# Altium footprint library FootPrintLib_0.PcbLib: 266 footprints (part 2 of 17)
Each footprint in its own frame and in the unit in brackets; x right, y up, seen from the top. Pads: shape width x height; smd on the part's side, far side on the other; paste and mask are expansions set on the pad; w line width, h text height; cw(c..) or ccw(c..) is an arc to the next point about the centre after c.
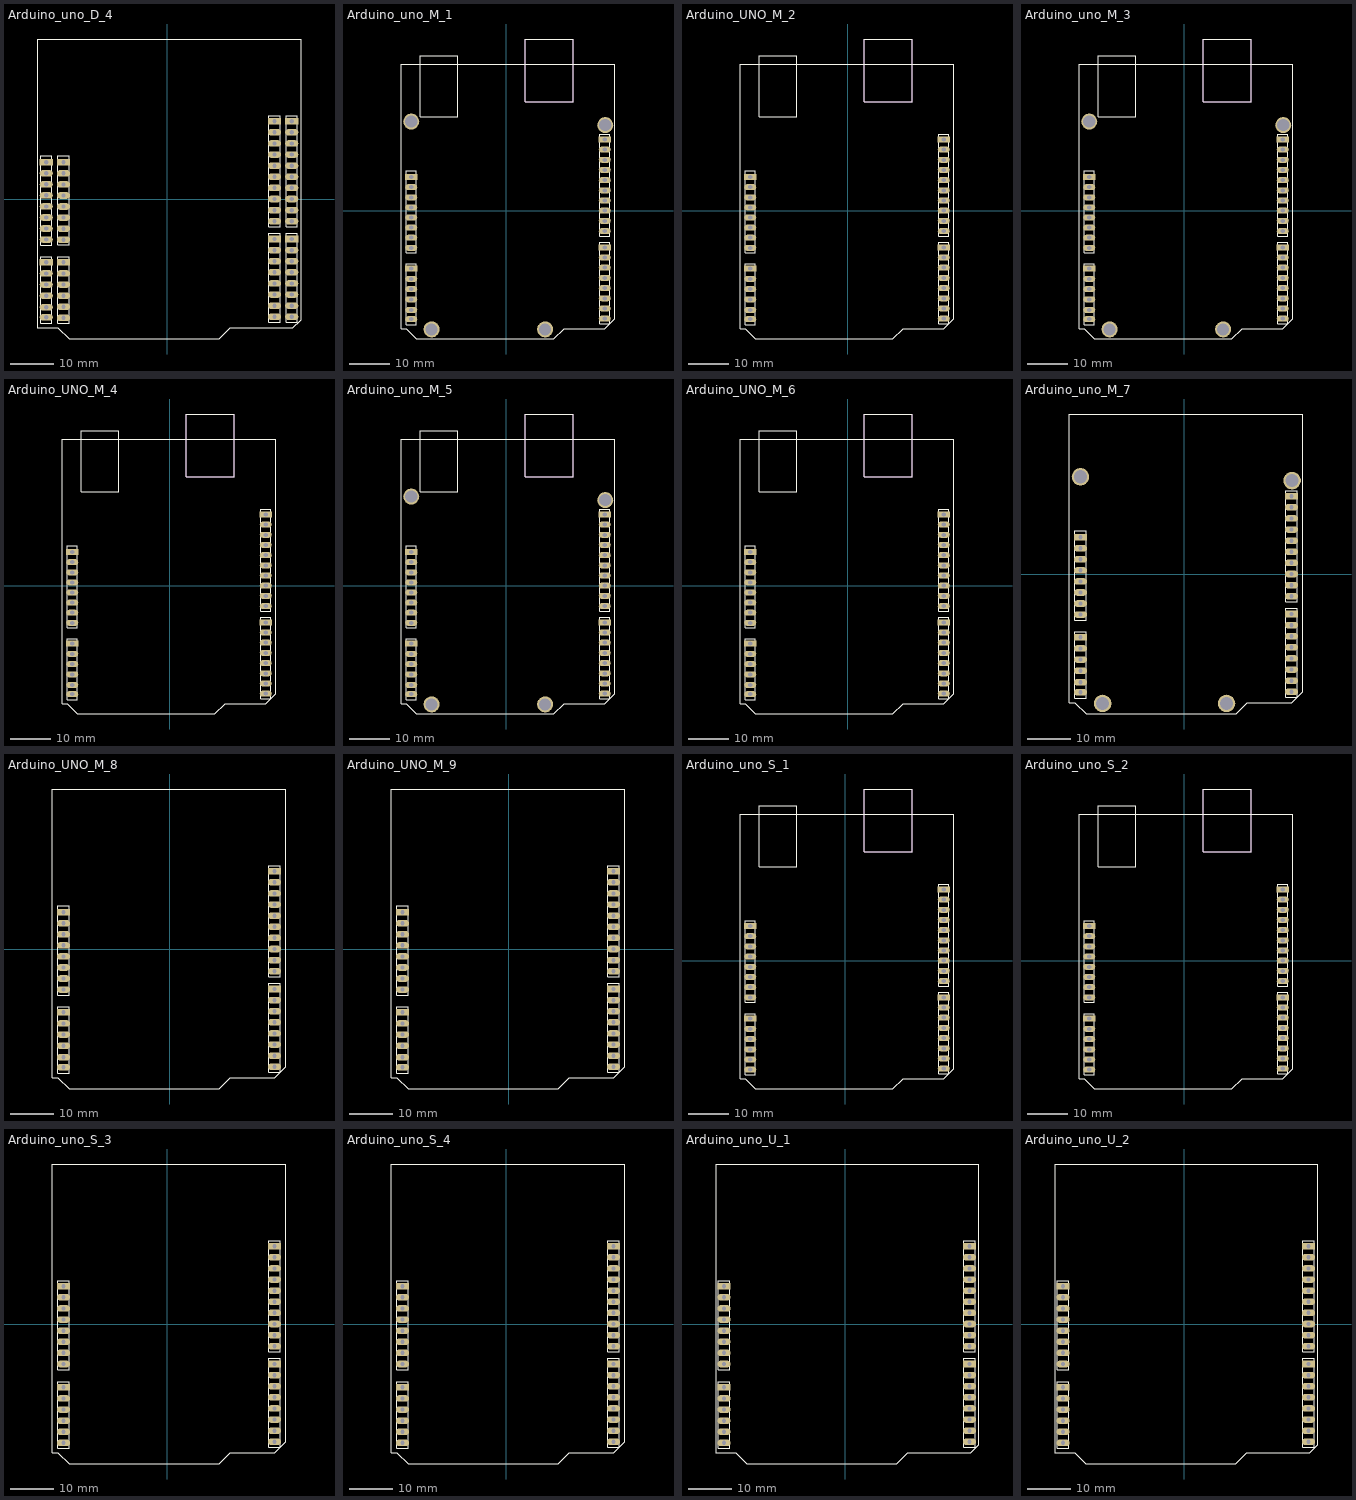
[diagram p1: the footprints below, top view; thin cyan lines are the x and y axes]

## Arduino_uno_D_4 [mm]
pads (64):
  rect 3x1.5 hole 1: 1(-27.686,8.382) 1(-23.749,8.37) 9(-27.686,-14.478) 9(-23.749,-14.478) 22(24.511,-9.144) 22(28.448,-9.144) 32(24.511,17.78) 32(28.448,17.78)
  oval 3x1.5 hole 1: 2(-27.686,5.86) 2(-23.749,5.848) 3(-27.686,3.338) 3(-23.749,3.326) 4(-27.686,0.816) 4(-23.749,0.804) 5(-27.686,-1.705) 5(-23.749,-1.717) 6(-27.686,-4.227) 6(-23.749,-4.239) 7(-27.686,-6.749) 7(-23.749,-6.761) 8(-27.686,-9.271) 8(-23.749,-9.283) 10(-27.686,-17.018) 10(-23.749,-17.018) 11(-27.686,-19.558) 11(-23.749,-19.558) 12(-27.686,-22.098) 12(-23.749,-22.098) 13(-27.686,-24.765) 13(-23.749,-24.638) 14(-27.686,-27.051) 14(-23.749,-27.178) 15(24.511,-26.924) 15(28.448,-26.924) 16(24.511,-24.384) 16(28.448,-24.384) 17(24.511,-21.844) 17(28.448,-21.844) 18(24.511,-19.304) 18(28.448,-19.304) 19(24.511,-16.764) 19(28.448,-16.764) 20(24.511,-14.224) 20(28.448,-14.224) 21(24.511,-11.684) 21(28.448,-11.684) 23(24.511,-5.08) 23(28.448,-5.08) 24(24.511,-2.54) 24(28.448,-2.54) 25(24.511,0) 25(28.448,0) 26(24.511,2.54) 26(28.448,2.54) 27(24.511,5.08) 27(28.448,5.08) 28(24.511,7.62) 28(28.448,7.62) 29(24.511,10.16) 29(28.448,10.16) 30(24.511,12.7) 30(28.448,12.7) 31(24.511,15.24) 31(28.448,15.24)
Top Overlay:
  lines w0.127: -29.718,-29.464 -25.019,-29.464 -22.479,-32.004 11.811,-32.004 14.351,-29.464 28.702,-29.464 30.48,-27.686 30.48,36.576 -29.718,36.576 -29.718,-29.464
  lines w0.2: -25.019,-28.448 -22.479,-28.448 -22.479,-13.208 -25.019,-13.208 -25.019,-28.448 ; -25.019,-10.414 -22.479,-10.414 -22.479,9.906 -25.019,9.906 -25.019,-10.414 ; 23.241,-28.194 25.781,-28.194 25.781,-7.874 23.241,-7.874 23.241,-28.194 ; 23.241,-6.35 25.781,-6.35 25.781,-1.27 25.781,19.05 23.241,19.05 23.241,-1.27 23.241,-6.35
  lines w0.254: -28.956,-28.448 -26.416,-28.448 -26.416,-15.748 -26.416,-13.208 -27.686,-13.208 -28.956,-13.208 -28.956,-15.748 -28.956,-28.448 ; -28.956,-10.541 -26.416,-10.541 -26.416,9.906 -28.956,9.906 -28.956,-10.541 ; 27.178,-28.194 27.178,-7.874 29.718,-7.874 29.718,-28.194 27.178,-28.194 ; 27.178,-6.35 29.718,-6.35 29.718,-3.81 29.718,19.05 27.178,19.05 27.178,-3.81 27.178,-6.35

## Arduino_uno_M_1 [mm]
pads (36):
  rect 3x1.5 hole 1: 1(-23.749,8.382) 9(-23.749,-14.478) 22(24.511,-9.144) 32(24.511,17.78)
  oval 3x1.5 hole 1: 2(-23.749,5.86) 3(-23.749,3.338) 4(-23.749,0.816) 5(-23.749,-1.705) 6(-23.749,-4.227) 7(-23.749,-6.749) 8(-23.749,-9.271) 10(-23.749,-17.018) 11(-23.749,-19.558) 12(-23.749,-22.098) 13(-23.749,-24.765) 14(-23.749,-27.051) 15(24.511,-26.924) 16(24.511,-24.384) 17(24.511,-21.844) 18(24.511,-19.304) 19(24.511,-16.764) 20(24.511,-14.224) 21(24.511,-11.684) 23(24.511,-5.08) 24(24.511,-2.54) 25(24.511,0) 26(24.511,2.54) 27(24.511,5.08) 28(24.511,7.62) 29(24.511,10.16) 30(24.511,12.7) 31(24.511,15.24)
  round 4 hole 3: ""(-23.749,22.225) ""(-18.669,-29.591) ""(9.652,-29.591) ""(24.638,21.336)
Top Overlay:
  lines w0.127: -26.289,-29.464 -25.019,-29.464 -22.479,-32.004 11.811,-32.004 14.351,-29.464 24.511,-29.464 27.051,-26.924 27.051,36.576 -26.289,36.576 -26.289,-29.464
  lines w0.2: -21.537,29.208 -21.537,38.608 -12.137,38.608 -12.137,23.408 -19.05,23.408 ; -21.537,29.21 -21.537,23.408 -18.987,23.408 ; 4.648,34.839 4.648,42.819 16.688,42.819 16.688,34.839 ; 4.648,35.56 4.648,27.109 8.218,27.109 ; 8.128,27.109 16.688,27.109 16.688,34.798 ; 10.618,27.109 10.958,27.109
  lines w0.254: -25.019,-28.448 -25.019,-15.748 -25.019,-13.208 -23.749,-13.208 -22.479,-13.208 -22.479,-15.748 -22.479,-28.448 -25.019,-28.448 ; -25.019,-10.541 -25.019,9.906 -22.479,9.906 -22.479,-10.541 -25.019,-10.541 ; 23.241,-28.194 25.781,-28.194 25.781,-7.874 23.241,-7.874 23.241,-28.194 ; 23.241,-6.35 23.241,-3.81 23.241,19.05 25.781,19.05 25.781,-3.81 25.781,-6.35 23.241,-6.35
Mechanical 13:
  lines w0.1: 4.648,27.109 16.688,27.109 16.688,42.819 4.648,42.819 4.648,27.109
3D body "14389.STEP": height 10.95, standoff -3.7, extent 3.218,26.329 18.118,42.829
3D body "SW3dPS-PowerJack-2.5x5.7mm.STEP": height 11, standoff -3.5, extent -21.537,23.408 -12.137,38.608
3D body "61301011821.stp": height 8.55, standoff -3.06, extent 23.098,-6.666 25.598,19.234
3D body "61300811821.stp": height 8.55, standoff -3.06, extent 23.047,-28.586 25.547,-7.766
3D body "61300811821.stp": height 8.55, standoff -3.06, extent -24.897,-10.537 -22.397,10.283
3D body "61300611821.stp": height 8.55, standoff -3.06, extent -24.897,-28.622 -22.397,-12.882

## Arduino_UNO_M_2 [mm]
pads (32):
  rect 3x1.5 hole 1: 1(-24.257,8.382) 9(-24.257,-14.478) 22(24.003,-9.144) 32(24.003,17.78)
  oval 3x1.5 hole 1: 2(-24.257,5.86) 3(-24.257,3.338) 4(-24.257,0.816) 5(-24.257,-1.705) 6(-24.257,-4.227) 7(-24.257,-6.749) 8(-24.257,-9.271) 10(-24.257,-17.018) 11(-24.257,-19.558) 12(-24.257,-22.098) 13(-24.257,-24.765) 14(-24.257,-27.051) 15(24.003,-26.924) 16(24.003,-24.384) 17(24.003,-21.844) 18(24.003,-19.304) 19(24.003,-16.764) 20(24.003,-14.224) 21(24.003,-11.684) 23(24.003,-5.08) 24(24.003,-2.54) 25(24.003,0) 26(24.003,2.54) 27(24.003,5.08) 28(24.003,7.62) 29(24.003,10.16) 30(24.003,12.7) 31(24.003,15.24)
Top Overlay:
  lines w0.127: -26.797,-29.464 -25.527,-29.464 -22.987,-32.004 11.303,-32.004 13.843,-29.464 24.003,-29.464 26.543,-26.924 26.543,36.576 -26.797,36.576 -26.797,-29.464
  lines w0.2: -22.045,29.208 -22.045,38.608 -12.645,38.608 -12.645,23.408 -19.558,23.408 ; -22.045,29.21 -22.045,23.408 -19.495,23.408 ; 4.14,34.839 4.14,42.819 16.18,42.819 16.18,34.839 ; 4.14,35.56 4.14,27.109 7.71,27.109 ; 7.62,27.109 16.18,27.109 16.18,34.798 ; 10.11,27.109 10.45,27.109
  lines w0.254: -25.527,-28.448 -25.527,-15.748 -25.527,-13.208 -24.257,-13.208 -22.987,-13.208 -22.987,-15.748 -22.987,-28.448 -25.527,-28.448 ; -25.527,-10.541 -25.527,9.906 -22.987,9.906 -22.987,-10.541 -25.527,-10.541 ; 22.733,-28.194 25.273,-28.194 25.273,-7.874 22.733,-7.874 22.733,-28.194 ; 22.733,-6.35 22.733,-3.81 22.733,19.05 25.273,19.05 25.273,-3.81 25.273,-6.35 22.733,-6.35
Mechanical 13:
  lines w0.1: 4.14,27.109 16.18,27.109 16.18,42.819 4.14,42.819 4.14,27.109
3D body "14389.STEP": height 10.95, standoff -3.7, extent 2.71,26.329 17.61,42.829
3D body "SW3dPS-PowerJack-2.5x5.7mm.STEP": height 11, standoff -3.5, extent -22.045,23.408 -12.645,38.608
3D body "61300611821.stp": height 8.55, standoff -3.06, extent -25.481,-28.622 -22.981,-12.882
3D body "61300811821.stp": height 8.55, standoff -3.06, extent -25.481,-10.537 -22.981,10.283
3D body "61300811821.stp": height 8.55, standoff -3.06, extent 22.793,-28.586 25.293,-7.766
3D body "61301011821.stp": height 8.55, standoff -3.06, extent 22.844,-6.666 25.344,19.234

## Arduino_uno_M_3 [mm]
pads (36):
  rect 3x1.5 hole 1: 1(-23.749,8.382) 9(-23.749,-14.478) 22(24.511,-9.144) 32(24.511,17.78)
  oval 3x1.5 hole 1: 2(-23.749,5.86) 3(-23.749,3.338) 4(-23.749,0.816) 5(-23.749,-1.705) 6(-23.749,-4.227) 7(-23.749,-6.749) 8(-23.749,-9.271) 10(-23.749,-17.018) 11(-23.749,-19.558) 12(-23.749,-22.098) 13(-23.749,-24.765) 14(-23.749,-27.051) 15(24.511,-26.924) 16(24.511,-24.384) 17(24.511,-21.844) 18(24.511,-19.304) 19(24.511,-16.764) 20(24.511,-14.224) 21(24.511,-11.684) 23(24.511,-5.08) 24(24.511,-2.54) 25(24.511,0) 26(24.511,2.54) 27(24.511,5.08) 28(24.511,7.62) 29(24.511,10.16) 30(24.511,12.7) 31(24.511,15.24)
  round 4 hole 3: ""(-23.749,22.225) ""(-18.669,-29.591) ""(9.652,-29.591) ""(24.638,21.336)
Top Overlay:
  lines w0.127: -26.289,-29.464 -25.019,-29.464 -22.479,-32.004 11.811,-32.004 14.351,-29.464 24.511,-29.464 27.051,-26.924 27.051,36.576 -26.289,36.576 -26.289,-29.464
  lines w0.2: -21.537,29.208 -21.537,38.608 -12.137,38.608 -12.137,23.408 -19.05,23.408 ; -21.537,29.21 -21.537,23.408 -18.987,23.408 ; 4.648,34.839 4.648,42.819 16.688,42.819 16.688,34.839 ; 4.648,35.56 4.648,27.109 8.218,27.109 ; 8.128,27.109 16.688,27.109 16.688,34.798 ; 10.618,27.109 10.958,27.109
  lines w0.254: -25.019,-28.448 -25.019,-15.748 -25.019,-13.208 -23.749,-13.208 -22.479,-13.208 -22.479,-15.748 -22.479,-28.448 -25.019,-28.448 ; -25.019,-10.541 -25.019,9.906 -22.479,9.906 -22.479,-10.541 -25.019,-10.541 ; 23.241,-28.194 25.781,-28.194 25.781,-7.874 23.241,-7.874 23.241,-28.194 ; 23.241,-6.35 23.241,-3.81 23.241,19.05 25.781,19.05 25.781,-3.81 25.781,-6.35 23.241,-6.35
Mechanical 13:
  lines w0.1: 4.648,27.109 16.688,27.109 16.688,42.819 4.648,42.819 4.648,27.109
3D body "61301011821.stp": height 8.55, standoff -3.06, extent 23.199,-6.818 25.699,19.082
3D body "61300811821.stp": height 8.55, standoff -3.06, extent 23.149,-28.738 25.649,-7.918
3D body "61300811821.stp": height 8.55, standoff -3.06, extent -25.126,-10.613 -22.626,10.207
3D body "61300611821.stp": height 8.55, standoff -3.06, extent -25.126,-28.698 -22.626,-12.958

## Arduino_UNO_M_4 [mm]
pads (32):
  rect 3x1.5 hole 1: 1(-24.257,8.382) 9(-24.257,-14.478) 22(24.003,-9.144) 32(24.003,17.78)
  oval 3x1.5 hole 1: 2(-24.257,5.86) 3(-24.257,3.338) 4(-24.257,0.816) 5(-24.257,-1.705) 6(-24.257,-4.227) 7(-24.257,-6.749) 8(-24.257,-9.271) 10(-24.257,-17.018) 11(-24.257,-19.558) 12(-24.257,-22.098) 13(-24.257,-24.765) 14(-24.257,-27.051) 15(24.003,-26.924) 16(24.003,-24.384) 17(24.003,-21.844) 18(24.003,-19.304) 19(24.003,-16.764) 20(24.003,-14.224) 21(24.003,-11.684) 23(24.003,-5.08) 24(24.003,-2.54) 25(24.003,0) 26(24.003,2.54) 27(24.003,5.08) 28(24.003,7.62) 29(24.003,10.16) 30(24.003,12.7) 31(24.003,15.24)
Top Overlay:
  lines w0.127: -26.797,-29.464 -25.527,-29.464 -22.987,-32.004 11.303,-32.004 13.843,-29.464 24.003,-29.464 26.543,-26.924 26.543,36.576 -26.797,36.576 -26.797,-29.464
  lines w0.2: -22.045,29.208 -22.045,38.608 -12.645,38.608 -12.645,23.408 -19.558,23.408 ; -22.045,29.21 -22.045,23.408 -19.495,23.408 ; 4.14,34.839 4.14,42.819 16.18,42.819 16.18,34.839 ; 4.14,35.56 4.14,27.109 7.71,27.109 ; 7.62,27.109 16.18,27.109 16.18,34.798 ; 10.11,27.109 10.45,27.109
  lines w0.254: -25.527,-28.448 -25.527,-15.748 -25.527,-13.208 -24.257,-13.208 -22.987,-13.208 -22.987,-15.748 -22.987,-28.448 -25.527,-28.448 ; -25.527,-10.541 -25.527,9.906 -22.987,9.906 -22.987,-10.541 -25.527,-10.541 ; 22.733,-28.194 25.273,-28.194 25.273,-7.874 22.733,-7.874 22.733,-28.194 ; 22.733,-6.35 22.733,-3.81 22.733,19.05 25.273,19.05 25.273,-3.81 25.273,-6.35 22.733,-6.35
Mechanical 13:
  lines w0.1: 4.14,27.109 16.18,27.109 16.18,42.819 4.14,42.819 4.14,27.109
3D body "61301011821.stp": height 8.55, standoff -3.06, extent 22.844,-6.666 25.344,19.234
3D body "61300811821.stp": height 8.55, standoff -3.06, extent 22.793,-28.586 25.293,-7.766
3D body "61300811821.stp": height 8.55, standoff -3.06, extent -25.634,-10.69 -23.134,10.13
3D body "61300611821.stp": height 8.55, standoff -3.06, extent -25.634,-28.774 -23.134,-13.034

## Arduino_uno_M_5 [mm]
pads (36):
  rect 3x1.5 hole 1: 1(-23.749,8.382) 9(-23.749,-14.478) 22(24.511,-9.144) 32(24.511,17.78)
  oval 3x1.5 hole 1: 2(-23.749,5.86) 3(-23.749,3.338) 4(-23.749,0.816) 5(-23.749,-1.705) 6(-23.749,-4.227) 7(-23.749,-6.749) 8(-23.749,-9.271) 10(-23.749,-17.018) 11(-23.749,-19.558) 12(-23.749,-22.098) 13(-23.749,-24.765) 14(-23.749,-27.051) 15(24.511,-26.924) 16(24.511,-24.384) 17(24.511,-21.844) 18(24.511,-19.304) 19(24.511,-16.764) 20(24.511,-14.224) 21(24.511,-11.684) 23(24.511,-5.08) 24(24.511,-2.54) 25(24.511,0) 26(24.511,2.54) 27(24.511,5.08) 28(24.511,7.62) 29(24.511,10.16) 30(24.511,12.7) 31(24.511,15.24)
  round 4 hole 3: ""(-23.749,22.225) ""(-18.669,-29.591) ""(9.652,-29.591) ""(24.638,21.336)
Top Overlay:
  lines w0.127: -26.289,-29.464 -25.019,-29.464 -22.479,-32.004 11.811,-32.004 14.351,-29.464 24.511,-29.464 27.051,-26.924 27.051,36.576 -26.289,36.576 -26.289,-29.464
  lines w0.2: -21.537,29.208 -21.537,38.608 -12.137,38.608 -12.137,23.408 -19.05,23.408 ; -21.537,29.21 -21.537,23.408 -18.987,23.408 ; 4.648,34.839 4.648,42.819 16.688,42.819 16.688,34.839 ; 4.648,35.56 4.648,27.109 8.218,27.109 ; 8.128,27.109 16.688,27.109 16.688,34.798 ; 10.618,27.109 10.958,27.109
  lines w0.254: -25.019,-28.448 -25.019,-15.748 -25.019,-13.208 -23.749,-13.208 -22.479,-13.208 -22.479,-15.748 -22.479,-28.448 -25.019,-28.448 ; -25.019,-10.541 -25.019,9.906 -22.479,9.906 -22.479,-10.541 -25.019,-10.541 ; 23.241,-28.194 25.781,-28.194 25.781,-7.874 23.241,-7.874 23.241,-28.194 ; 23.241,-6.35 23.241,-3.81 23.241,19.05 25.781,19.05 25.781,-3.81 25.781,-6.35 23.241,-6.35
Mechanical 13:
  lines w0.1: 4.648,27.109 16.688,27.109 16.688,42.819 4.648,42.819 4.648,27.109

## Arduino_UNO_M_6 [mm]
pads (32):
  rect 3x1.5 hole 1: 1(-24.257,8.382) 9(-24.257,-14.478) 22(24.003,-9.144) 32(24.003,17.78)
  oval 3x1.5 hole 1: 2(-24.257,5.86) 3(-24.257,3.338) 4(-24.257,0.816) 5(-24.257,-1.705) 6(-24.257,-4.227) 7(-24.257,-6.749) 8(-24.257,-9.271) 10(-24.257,-17.018) 11(-24.257,-19.558) 12(-24.257,-22.098) 13(-24.257,-24.765) 14(-24.257,-27.051) 15(24.003,-26.924) 16(24.003,-24.384) 17(24.003,-21.844) 18(24.003,-19.304) 19(24.003,-16.764) 20(24.003,-14.224) 21(24.003,-11.684) 23(24.003,-5.08) 24(24.003,-2.54) 25(24.003,0) 26(24.003,2.54) 27(24.003,5.08) 28(24.003,7.62) 29(24.003,10.16) 30(24.003,12.7) 31(24.003,15.24)
Top Overlay:
  lines w0.127: -26.797,-29.464 -25.527,-29.464 -22.987,-32.004 11.303,-32.004 13.843,-29.464 24.003,-29.464 26.543,-26.924 26.543,36.576 -26.797,36.576 -26.797,-29.464
  lines w0.2: -22.045,29.208 -22.045,38.608 -12.645,38.608 -12.645,23.408 -19.558,23.408 ; -22.045,29.21 -22.045,23.408 -19.495,23.408 ; 4.14,34.839 4.14,42.819 16.18,42.819 16.18,34.839 ; 4.14,35.56 4.14,27.109 7.71,27.109 ; 7.62,27.109 16.18,27.109 16.18,34.798 ; 10.11,27.109 10.45,27.109
  lines w0.254: -25.527,-28.448 -25.527,-15.748 -25.527,-13.208 -24.257,-13.208 -22.987,-13.208 -22.987,-15.748 -22.987,-28.448 -25.527,-28.448 ; -25.527,-10.541 -25.527,9.906 -22.987,9.906 -22.987,-10.541 -25.527,-10.541 ; 22.733,-28.194 25.273,-28.194 25.273,-7.874 22.733,-7.874 22.733,-28.194 ; 22.733,-6.35 22.733,-3.81 22.733,19.05 25.273,19.05 25.273,-3.81 25.273,-6.35 22.733,-6.35
Mechanical 13:
  lines w0.1: 4.14,27.109 16.18,27.109 16.18,42.819 4.14,42.819 4.14,27.109

## Arduino_uno_M_7 [mm]
pads (36):
  rect 3x1.5 hole 1: 1(-23.749,8.382) 9(-23.749,-14.478) 22(24.511,-9.144) 32(24.511,17.78)
  oval 3x1.5 hole 1: 2(-23.749,5.86) 3(-23.749,3.338) 4(-23.749,0.816) 5(-23.749,-1.705) 6(-23.749,-4.227) 7(-23.749,-6.749) 8(-23.749,-9.271) 10(-23.749,-17.018) 11(-23.749,-19.558) 12(-23.749,-22.098) 13(-23.749,-24.765) 14(-23.749,-27.051) 15(24.511,-26.924) 16(24.511,-24.384) 17(24.511,-21.844) 18(24.511,-19.304) 19(24.511,-16.764) 20(24.511,-14.224) 21(24.511,-11.684) 23(24.511,-5.08) 24(24.511,-2.54) 25(24.511,0) 26(24.511,2.54) 27(24.511,5.08) 28(24.511,7.62) 29(24.511,10.16) 30(24.511,12.7) 31(24.511,15.24)
  round 4 hole 3: ""(-23.749,22.225) ""(-18.669,-29.591) ""(9.652,-29.591) ""(24.638,21.336)
Top Overlay:
  lines w0.127: -26.289,-29.464 -25.019,-29.464 -22.479,-32.004 11.811,-32.004 14.351,-29.464 24.511,-29.464 27.051,-26.924 27.051,36.576 -26.289,36.576 -26.289,-29.464
  lines w0.254: -25.019,-28.448 -25.019,-15.748 -25.019,-13.208 -23.749,-13.208 -22.479,-13.208 -22.479,-15.748 -22.479,-28.448 -25.019,-28.448 ; -25.019,-10.541 -25.019,9.906 -22.479,9.906 -22.479,-10.541 -25.019,-10.541 ; 23.241,-28.194 25.781,-28.194 25.781,-7.874 23.241,-7.874 23.241,-28.194 ; 23.241,-6.35 23.241,-3.81 23.241,19.05 25.781,19.05 25.781,-3.81 25.781,-6.35 23.241,-6.35

## Arduino_UNO_M_8 [mm]
pads (32):
  rect 3x1.5 hole 1: 1(-24.257,8.382) 9(-24.257,-14.478) 22(24.003,-9.144) 32(24.003,17.78)
  oval 3x1.5 hole 1: 2(-24.257,5.86) 3(-24.257,3.338) 4(-24.257,0.816) 5(-24.257,-1.705) 6(-24.257,-4.227) 7(-24.257,-6.749) 8(-24.257,-9.271) 10(-24.257,-17.018) 11(-24.257,-19.558) 12(-24.257,-22.098) 13(-24.257,-24.765) 14(-24.257,-27.051) 15(24.003,-26.924) 16(24.003,-24.384) 17(24.003,-21.844) 18(24.003,-19.304) 19(24.003,-16.764) 20(24.003,-14.224) 21(24.003,-11.684) 23(24.003,-5.08) 24(24.003,-2.54) 25(24.003,0) 26(24.003,2.54) 27(24.003,5.08) 28(24.003,7.62) 29(24.003,10.16) 30(24.003,12.7) 31(24.003,15.24)
Top Overlay:
  lines w0.127: -26.797,-29.464 -25.527,-29.464 -22.987,-32.004 11.303,-32.004 13.843,-29.464 24.003,-29.464 26.543,-26.924 26.543,36.576 -26.797,36.576 -26.797,-29.464
  lines w0.254: -25.527,-28.448 -25.527,-15.748 -25.527,-13.208 -24.257,-13.208 -22.987,-13.208 -22.987,-15.748 -22.987,-28.448 -25.527,-28.448 ; -25.527,-10.541 -25.527,9.906 -22.987,9.906 -22.987,-10.541 -25.527,-10.541 ; 22.733,-28.194 25.273,-28.194 25.273,-7.874 22.733,-7.874 22.733,-28.194 ; 22.733,-6.35 22.733,-3.81 22.733,19.05 25.273,19.05 25.273,-3.81 25.273,-6.35 22.733,-6.35

## Arduino_UNO_M_9 [mm]
pads (32):
  rect 3x1.5 hole 1: 1(-24.257,8.382) 9(-24.257,-14.478) 22(24.003,-9.144) 32(24.003,17.78)
  oval 3x1.5 hole 1: 2(-24.257,5.86) 3(-24.257,3.338) 4(-24.257,0.816) 5(-24.257,-1.705) 6(-24.257,-4.227) 7(-24.257,-6.749) 8(-24.257,-9.271) 10(-24.257,-17.018) 11(-24.257,-19.558) 12(-24.257,-22.098) 13(-24.257,-24.765) 14(-24.257,-27.051) 15(24.003,-26.924) 16(24.003,-24.384) 17(24.003,-21.844) 18(24.003,-19.304) 19(24.003,-16.764) 20(24.003,-14.224) 21(24.003,-11.684) 23(24.003,-5.08) 24(24.003,-2.54) 25(24.003,0) 26(24.003,2.54) 27(24.003,5.08) 28(24.003,7.62) 29(24.003,10.16) 30(24.003,12.7) 31(24.003,15.24)
Top Overlay:
  lines w0.127: -26.797,-29.464 -26.797,36.576 26.543,36.576 26.543,-26.924 24.003,-29.464 13.843,-29.464 11.303,-32.004 -22.987,-32.004 -25.527,-29.464 -26.797,-29.464
  lines w0.254: -25.527,-28.448 -22.987,-28.448 -22.987,-15.748 -22.987,-13.208 -24.257,-13.208 -25.527,-13.208 -25.527,-15.748 -25.527,-28.448 ; -25.527,-10.541 -22.987,-10.541 -22.987,9.906 -25.527,9.906 -25.527,-10.541 ; 22.733,-28.194 22.733,-7.874 25.273,-7.874 25.273,-28.194 22.733,-28.194 ; 22.733,-6.35 25.273,-6.35 25.273,-3.81 25.273,19.05 22.733,19.05 22.733,-3.81 22.733,-6.35
3D body "61301011821.stp": height 8.55, standoff -3.06, extent 22.844,-6.564 25.344,19.336
3D body "61300811821.stp": height 8.55, standoff -3.06, extent 22.793,-28.484 25.293,-7.664
3D body "61300811821.stp": height 8.55, standoff -3.06, extent -25.583,-10.512 -23.083,10.308
3D body "61300611821.stp": height 8.55, standoff -3.06, extent -25.583,-28.597 -23.083,-12.857

## Arduino_uno_S_1 [mm]
pads (32):
  rect 3x1.5 hole 1: 1(-23.749,8.636) 9(-23.749,-14.478) 22(24.511,-9.144) 32(24.511,17.78)
  oval 3x1.5 hole 1: 2(-23.749,6.096) 3(-23.749,3.556) 4(-23.749,1.016) 5(-23.749,-1.524) 6(-23.749,-4.064) 7(-23.749,-6.604) 8(-23.749,-9.144) 10(-23.749,-17.018) 11(-23.749,-19.558) 12(-23.749,-22.098) 13(-23.749,-24.638) 14(-23.749,-27.178) 15(24.511,-26.924) 16(24.511,-24.384) 17(24.511,-21.844) 18(24.511,-19.304) 19(24.511,-16.764) 20(24.511,-14.224) 21(24.511,-11.684) 23(24.511,-5.08) 24(24.511,-2.54) 25(24.511,0) 26(24.511,2.54) 27(24.511,5.08) 28(24.511,7.62) 29(24.511,10.16) 30(24.511,12.7) 31(24.511,15.24)
Top Overlay:
  lines w0.127: -26.289,-29.464 -26.289,36.576 27.051,36.576 27.051,-26.924 24.511,-29.464 14.351,-29.464 11.811,-32.004 -22.479,-32.004 -25.019,-29.464 -26.289,-29.464
  lines w0.2: -21.537,29.208 -21.537,38.608 -12.137,38.608 -12.137,23.408 -19.05,23.408 ; -21.537,29.21 -21.537,23.408 -18.987,23.408 ; 4.648,34.839 4.648,42.819 16.688,42.819 16.688,34.839 ; 4.648,35.56 4.648,27.109 8.218,27.109 ; 8.128,27.109 16.688,27.109 16.688,34.798 ; 10.618,27.109 10.958,27.109 ; -25.019,-28.448 -25.019,-13.208 -22.479,-13.208 -22.479,-28.448 -25.019,-28.448 ; -25.019,-10.414 -25.019,9.906 -22.479,9.906 -22.479,-10.414 -25.019,-10.414 ; 23.241,-28.194 23.241,-7.874 25.781,-7.874 25.781,-28.194 23.241,-28.194 ; 23.241,-6.35 23.241,-1.27 23.241,19.05 25.781,19.05 25.781,-1.27 25.781,-6.35 23.241,-6.35
Mechanical 13:
  lines w0.1: 4.648,27.109 4.648,42.819 16.688,42.819 16.688,27.109 4.648,27.109
3D body "header 8.STEP": height 8.51, standoff -3.68, extent -25.009,-10.409 -22.479,9.901
3D body "header 8.STEP": height 8.51, standoff -3.68, extent 23.251,-28.194 25.781,-7.884
3D body "header 6.STEP": height 8.51, standoff -3.68, extent -25.019,-28.311 -22.489,-13.081
3D body "header 8.STEP": height 8.51, standoff -3.68, extent 23.241,-1.26 25.771,19.05
3D body "header 2.STEP": height 8.51, standoff -3.68, extent 23.241,-6.345 25.771,-1.275

## Arduino_uno_S_2 [mm]
pads (32):
  rect 3x1.5 hole 1: 1(-23.749,8.636) 9(-23.749,-14.478) 22(24.511,-9.144) 32(24.511,17.78)
  oval 3x1.5 hole 1: 2(-23.749,6.096) 3(-23.749,3.556) 4(-23.749,1.016) 5(-23.749,-1.524) 6(-23.749,-4.064) 7(-23.749,-6.604) 8(-23.749,-9.144) 10(-23.749,-17.018) 11(-23.749,-19.558) 12(-23.749,-22.098) 13(-23.749,-24.638) 14(-23.749,-27.178) 15(24.511,-26.924) 16(24.511,-24.384) 17(24.511,-21.844) 18(24.511,-19.304) 19(24.511,-16.764) 20(24.511,-14.224) 21(24.511,-11.684) 23(24.511,-5.08) 24(24.511,-2.54) 25(24.511,0) 26(24.511,2.54) 27(24.511,5.08) 28(24.511,7.62) 29(24.511,10.16) 30(24.511,12.7) 31(24.511,15.24)
Top Overlay:
  lines w0.127: -26.289,-29.464 -25.019,-29.464 -22.479,-32.004 11.811,-32.004 14.351,-29.464 24.511,-29.464 27.051,-26.924 27.051,36.576 -26.289,36.576 -26.289,-29.464
  lines w0.2: -21.537,29.208 -21.537,38.608 -12.137,38.608 -12.137,23.408 -19.05,23.408 ; -21.537,29.21 -21.537,23.408 -18.987,23.408 ; 4.648,34.839 4.648,42.819 16.688,42.819 16.688,34.839 ; 4.648,35.56 4.648,27.109 8.218,27.109 ; 8.128,27.109 16.688,27.109 16.688,34.798 ; 10.618,27.109 10.958,27.109 ; -25.019,-28.448 -22.479,-28.448 -22.479,-13.208 -25.019,-13.208 -25.019,-28.448 ; -25.019,-10.414 -22.479,-10.414 -22.479,9.906 -25.019,9.906 -25.019,-10.414 ; 23.241,-28.194 25.781,-28.194 25.781,-7.874 23.241,-7.874 23.241,-28.194 ; 23.241,-6.35 25.781,-6.35 25.781,-1.27 25.781,19.05 23.241,19.05 23.241,-1.27 23.241,-6.35
Mechanical 13:
  lines w0.1: 4.648,27.109 16.688,27.109 16.688,42.819 4.648,42.819 4.648,27.109

## Arduino_uno_S_3 [mm]
pads (32):
  rect 3x1.5 hole 1: 1(-23.749,8.636) 9(-23.749,-14.478) 22(24.511,-9.144) 32(24.511,17.78)
  oval 3x1.5 hole 1: 2(-23.749,6.096) 3(-23.749,3.556) 4(-23.749,1.016) 5(-23.749,-1.524) 6(-23.749,-4.064) 7(-23.749,-6.604) 8(-23.749,-9.144) 10(-23.749,-17.018) 11(-23.749,-19.558) 12(-23.749,-22.098) 13(-23.749,-24.638) 14(-23.749,-27.178) 15(24.511,-26.924) 16(24.511,-24.384) 17(24.511,-21.844) 18(24.511,-19.304) 19(24.511,-16.764) 20(24.511,-14.224) 21(24.511,-11.684) 23(24.511,-5.08) 24(24.511,-2.54) 25(24.511,0) 26(24.511,2.54) 27(24.511,5.08) 28(24.511,7.62) 29(24.511,10.16) 30(24.511,12.7) 31(24.511,15.24)
Top Overlay:
  lines w0.127: -26.289,-29.464 -25.019,-29.464 -22.479,-32.004 11.811,-32.004 14.351,-29.464 24.511,-29.464 27.051,-26.924 27.051,36.576 -26.289,36.576 -26.289,-29.464
  lines w0.2: -25.019,-28.448 -22.479,-28.448 -22.479,-13.208 -25.019,-13.208 -25.019,-28.448 ; -25.019,-10.414 -22.479,-10.414 -22.479,9.906 -25.019,9.906 -25.019,-10.414 ; 23.241,-28.194 25.781,-28.194 25.781,-7.874 23.241,-7.874 23.241,-28.194 ; 23.241,-6.35 25.781,-6.35 25.781,-1.27 25.781,19.05 23.241,19.05 23.241,-1.27 23.241,-6.35
3D body "header 2.STEP": height 8.51, standoff -3.68, extent 23.241,-6.345 25.771,-1.275
3D body "header 8.STEP": height 8.51, standoff -3.68, extent 23.241,-1.26 25.771,19.05
3D body "header 6.STEP": height 8.51, standoff -3.68, extent -25.019,-28.311 -22.489,-13.081
3D body "header 8.STEP": height 8.51, standoff -3.68, extent 23.251,-28.194 25.781,-7.884
3D body "header 8.STEP": height 8.51, standoff -3.68, extent -25.009,-10.409 -22.479,9.901

## Arduino_uno_S_4 [mm]
pads (32):
  rect 3x1.5 hole 1: 1(-23.749,8.636) 9(-23.749,-14.478) 22(24.511,-9.144) 32(24.511,17.78)
  oval 3x1.5 hole 1: 2(-23.749,6.096) 3(-23.749,3.556) 4(-23.749,1.016) 5(-23.749,-1.524) 6(-23.749,-4.064) 7(-23.749,-6.604) 8(-23.749,-9.144) 10(-23.749,-17.018) 11(-23.749,-19.558) 12(-23.749,-22.098) 13(-23.749,-24.638) 14(-23.749,-27.178) 15(24.511,-26.924) 16(24.511,-24.384) 17(24.511,-21.844) 18(24.511,-19.304) 19(24.511,-16.764) 20(24.511,-14.224) 21(24.511,-11.684) 23(24.511,-5.08) 24(24.511,-2.54) 25(24.511,0) 26(24.511,2.54) 27(24.511,5.08) 28(24.511,7.62) 29(24.511,10.16) 30(24.511,12.7) 31(24.511,15.24)
Top Overlay:
  lines w0.127: -26.289,-29.464 -25.019,-29.464 -22.479,-32.004 11.811,-32.004 14.351,-29.464 24.511,-29.464 27.051,-26.924 27.051,36.576 -26.289,36.576 -26.289,-29.464
  lines w0.2: -25.019,-28.448 -22.479,-28.448 -22.479,-13.208 -25.019,-13.208 -25.019,-28.448 ; -25.019,-10.414 -22.479,-10.414 -22.479,9.906 -25.019,9.906 -25.019,-10.414 ; 23.241,-28.194 25.781,-28.194 25.781,-7.874 23.241,-7.874 23.241,-28.194 ; 23.241,-6.35 25.781,-6.35 25.781,-1.27 25.781,19.05 23.241,19.05 23.241,-1.27 23.241,-6.35

## Arduino_uno_U_1 [mm]
pads (32):
  rect 3x1.5 hole 1: 1(-27.686,8.636) 9(-27.686,-14.478) 22(28.448,-9.144) 32(28.448,17.78)
  oval 3x1.5 hole 1: 2(-27.686,6.096) 3(-27.686,3.556) 4(-27.686,1.016) 5(-27.686,-1.524) 6(-27.686,-4.064) 7(-27.686,-6.604) 8(-27.686,-9.144) 10(-27.686,-17.018) 11(-27.686,-19.558) 12(-27.686,-22.098) 13(-27.686,-24.638) 14(-27.686,-27.178) 15(28.448,-26.924) 16(28.448,-24.384) 17(28.448,-21.844) 18(28.448,-19.304) 19(28.448,-16.764) 20(28.448,-14.224) 21(28.448,-11.684) 23(28.448,-5.08) 24(28.448,-2.54) 25(28.448,0) 26(28.448,2.54) 27(28.448,5.08) 28(28.448,7.62) 29(28.448,10.16) 30(28.448,12.7) 31(28.448,15.24)
Top Overlay:
  lines w0.127: -29.591,-29.464 -29.591,36.576 30.48,36.576 30.48,-27.686 28.702,-29.464 14.351,-29.464 11.811,-32.004 -22.479,-32.004 -25.019,-29.464 -29.591,-29.464
  lines w0.2: -28.956,-28.448 -28.956,-13.208 -26.416,-13.208 -26.416,-28.448 -28.956,-28.448 ; -28.956,-10.414 -28.956,9.906 -26.416,9.906 -26.416,-10.414 -28.956,-10.414 ; 27.178,-28.194 27.178,-7.874 29.718,-7.874 29.718,-28.194 27.178,-28.194 ; 27.178,-6.35 27.178,-1.27 27.178,19.05 29.718,19.05 29.718,-1.27 29.718,-6.35 27.178,-6.35
3D body "header 8.STEP": height 8.51, standoff -3.68, extent -28.946,-10.409 -26.416,9.901
3D body "header 8.STEP": height 8.51, standoff -3.68, extent 27.188,-28.194 29.718,-7.884
3D body "header 6.STEP": height 8.51, standoff -3.68, extent -28.956,-28.311 -26.426,-13.081
3D body "header 8.STEP": height 8.51, standoff -3.68, extent 27.178,-1.26 29.708,19.05
3D body "header 2.STEP": height 8.51, standoff -3.68, extent 27.178,-6.345 29.708,-1.275

## Arduino_uno_U_2 [mm]
pads (32):
  rect 3x1.5 hole 1: 1(-27.686,8.636) 9(-27.686,-14.478) 22(28.448,-9.144) 32(28.448,17.78)
  oval 3x1.5 hole 1: 2(-27.686,6.096) 3(-27.686,3.556) 4(-27.686,1.016) 5(-27.686,-1.524) 6(-27.686,-4.064) 7(-27.686,-6.604) 8(-27.686,-9.144) 10(-27.686,-17.018) 11(-27.686,-19.558) 12(-27.686,-22.098) 13(-27.686,-24.638) 14(-27.686,-27.178) 15(28.448,-26.924) 16(28.448,-24.384) 17(28.448,-21.844) 18(28.448,-19.304) 19(28.448,-16.764) 20(28.448,-14.224) 21(28.448,-11.684) 23(28.448,-5.08) 24(28.448,-2.54) 25(28.448,0) 26(28.448,2.54) 27(28.448,5.08) 28(28.448,7.62) 29(28.448,10.16) 30(28.448,12.7) 31(28.448,15.24)
Top Overlay:
  lines w0.127: -29.591,-29.464 -25.019,-29.464 -22.479,-32.004 11.811,-32.004 14.351,-29.464 28.702,-29.464 30.48,-27.686 30.48,36.576 -29.591,36.576 -29.591,-29.464
  lines w0.2: -28.956,-28.448 -26.416,-28.448 -26.416,-13.208 -28.956,-13.208 -28.956,-28.448 ; -28.956,-10.414 -26.416,-10.414 -26.416,9.906 -28.956,9.906 -28.956,-10.414 ; 27.178,-28.194 29.718,-28.194 29.718,-7.874 27.178,-7.874 27.178,-28.194 ; 27.178,-6.35 29.718,-6.35 29.718,-1.27 29.718,19.05 27.178,19.05 27.178,-1.27 27.178,-6.35